# Altium schematic symbol library 2019-09-14_17-18-04.SchLib: 2 symbols
Pins are listed as number, name and electrical type; pins without a type are passive.

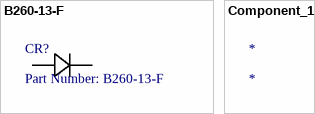
[diagram p0: symbols B260-13-F to Component_1]

## B260-13-F
designator CR?, comment Part Number: B260-13-F
No Description Available; Vendor: Diodes Inc; Built_By: EMA_UL_Team; Type: DEV; Manufacturer_Part_Number: B260-13-F; Copyright: Copyright (C) 2018 Accelerated Designs. All rights reserved; RefDes: RefDes; Value: Value
footprint SMB
pins: 1, 2

## Component_1
designator *